# Altium footprint library PG-TSDSO-14_L4.9-W3.9-P0.65-LS6.0-BL-EP.PcbLib: 1 footprints
Each footprint in its own frame and in the unit in brackets; x right, y up, seen from the top. Pads: shape width x height; smd on the part's side, far side on the other; paste and mask are expansions set on the pad; w line width, h text height; cw(c..) or ccw(c..) is an arc to the next point about the centre after c.
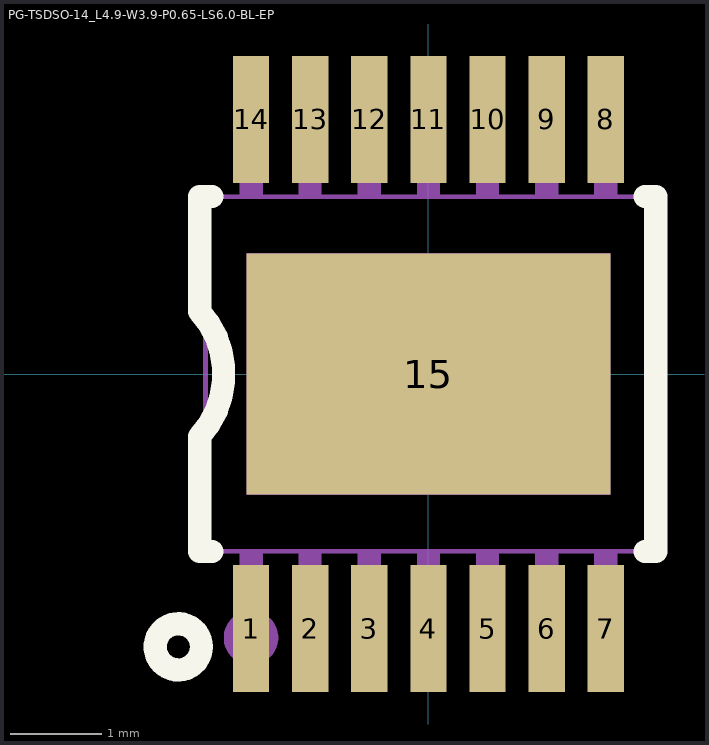
[diagram p0: the footprint, top view; thin cyan lines are the x and y axes]

## PG-TSDSO-14_L4.9-W3.9-P0.65-LS6.0-BL-EP [mil]
pads (15):
  rect 15.7x55.1 smd mask+2: 1(-76.8,-110.2) 2(-51.2,-110.2) 3(-25.6,-110.2) 4(0,-110.2) 5(25.6,-110.2) 6(51.2,-110.2) 7(76.8,-110.2) 8(76.8,110.2) 9(51.2,110.2) 10(25.6,110.2) 11(0,110.2) 12(-25.6,110.2) 13(-51.2,110.2) 14(-76.8,110.2)
  rect 157.5x104.3 smd mask+2: 15(0,0)
Top Overlay:
  circle w10: c-108.3,-118.1 r10
  lines w10: -93.7,-76.8 -99,-76.8 -99,-27 ccw(c-128.68,0) -99,27 -99,76.8 -93.7,76.8 ; 93.7,-76.8 98.4,-76.8 98.4,76.8 93.7,76.8
Mechanical 6:
  circle w11.8: c-76.8,-114.2 r5.9
Mechanical 15:
  drawing of 34 lines, arcs and shapes, not listed